# EAGLE library part VL53L1X-TOF400C (library moto-anomaly)
VL53L1X-TOF400C TOF400C VL53L1X 4 m ToF lazer mesafe (suspansiyon stroku, ileri asama). Kart: 25.0 x 13.0 mm - Guven: M STEP: GrabCAD 'VL53L1X module'
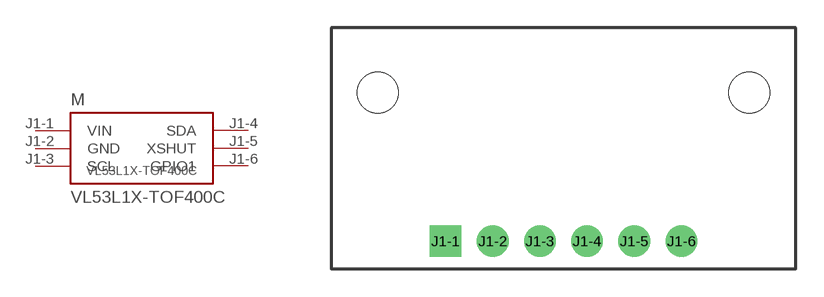
[diagram p5: symbol with the pads of VL53L1X-TOF400C; footprint VL53L1X-TOF400C]

Designator prefix M

## VL53L1X-TOF400C (BOARD_SIZE: 25.0x13.0mm; CONFIDENCE: M)  [VL53L1X-TOF400C]
J1-1  VIN  pas
J1-2  GND  pas
J1-3  SCL  pas
J1-4  SDA  pas
J1-5  XSHUT  pas
J1-6  GPIO1  pas

## Footprint VL53L1X-TOF400C (pad centres in mm)
TOF400C VL53L1X 4 m ToF lazer mesafe (suspansiyon stroku, ileri asama). | Kart: 25.0 x 13.0 mm | Guven: M
drill 1 pad 1.7 square: J1-1 -6.35,-5
drill 1 pad 1.7 round: J1-2 -3.81,-5; J1-3 -1.27,-5; J1-4 1.27,-5; J1-5 3.81,-5; J1-6 6.35,-5
hole 2.2 at -10,3
hole 2.2 at 10,3